# Altium footprint library CustomCase.PcbLib: 411 footprints (part 4 of 26)
Each footprint in its own frame and in the unit in brackets; x right, y up, seen from the top. Pads: shape width x height; smd on the part's side, far side on the other; paste and mask are expansions set on the pad; w line width, h text height; cw(c..) or ccw(c..) is an arc to the next point about the centre after c.
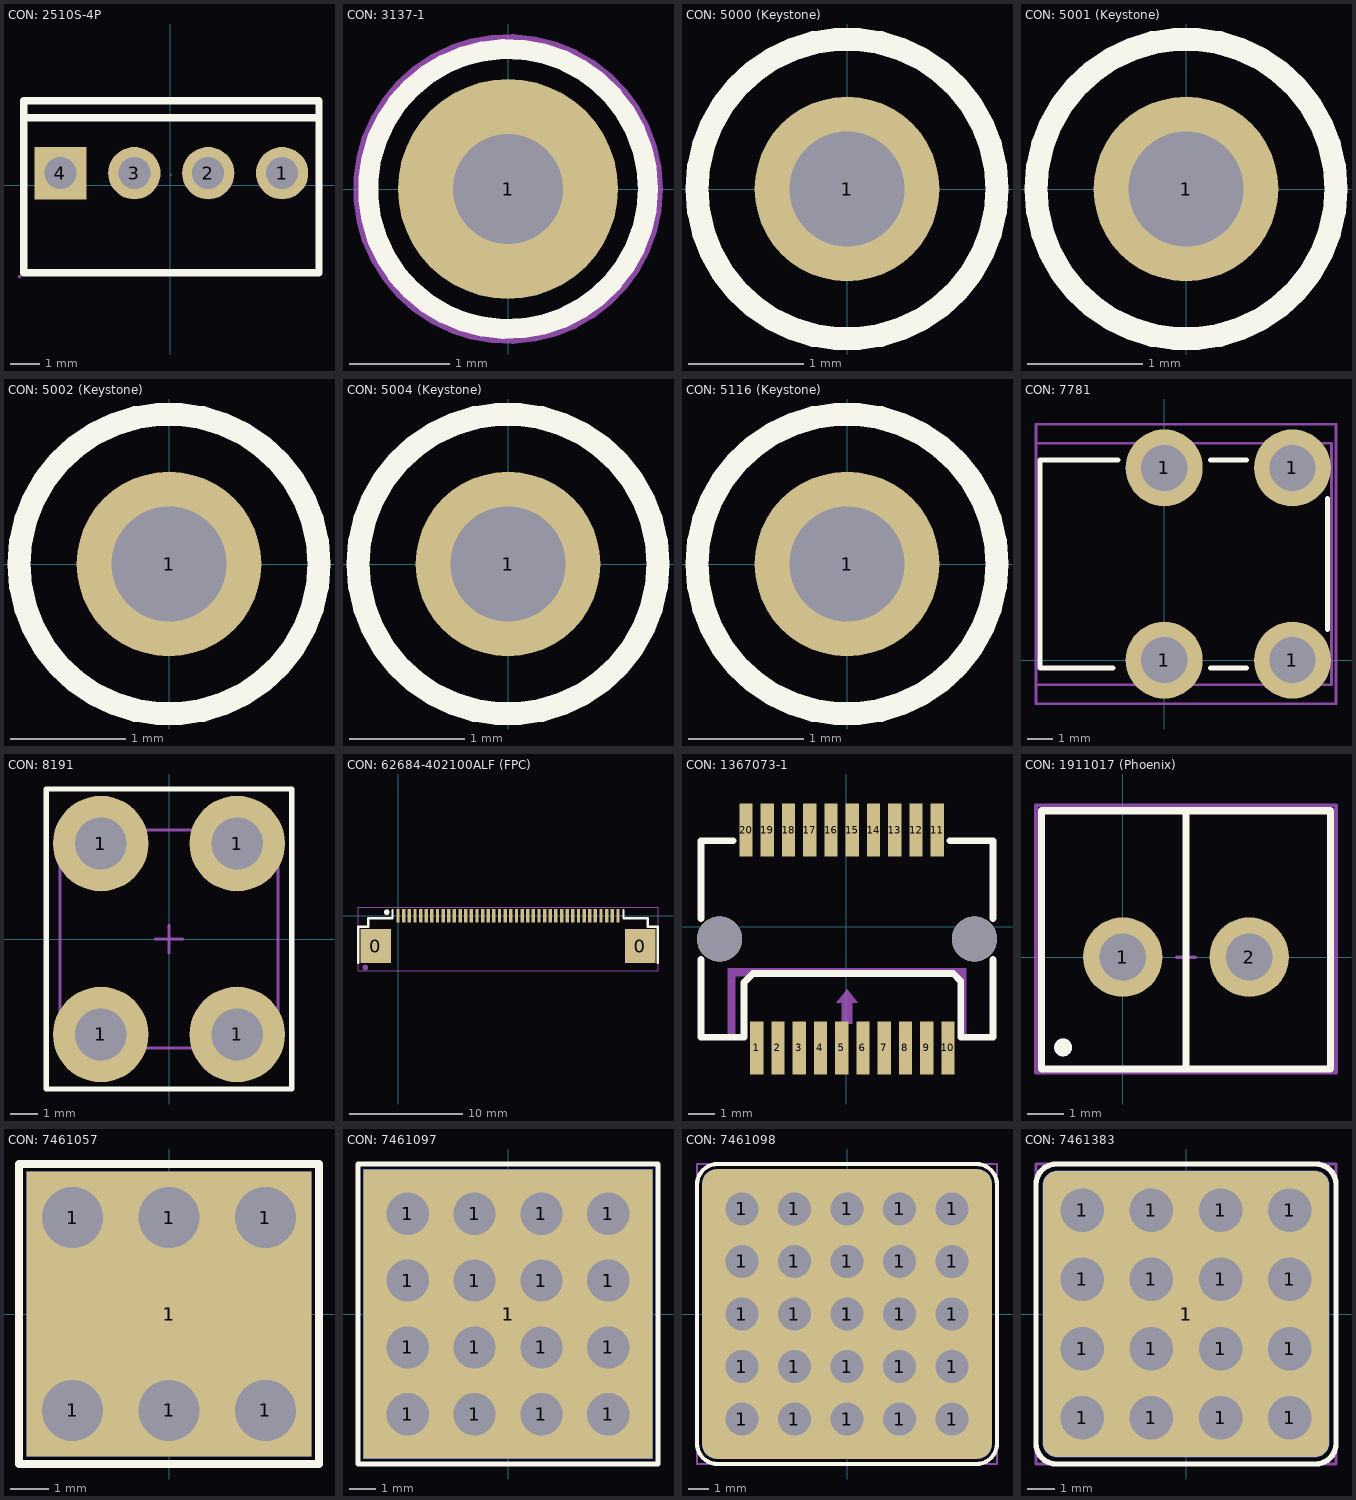
[diagram p3: the footprints below, top view; thin cyan lines are the x and y axes]

## CON: 2510S-4P [mm]
pads (4):
  round 1.8 hole 1.1: 1(3.847,0.425) 2(1.307,0.425) 3(-1.233,0.425)
  rect 1.8x1.8 hole 1.1: 4(-3.773,0.425)
Top Overlay:
  lines w0.254: -5.043,-2.623 -5.043,0.679 ; -5.043,2.33 5.117,2.33 ; -5.043,-3.004 -5.043,2.918 5.117,2.918 5.117,-3.004 -5.043,-3.004
Outside border (Mech5):
  circle w0.45: c3.847,0.425 r0.225
  circle w0.45: c1.307,0.425 r0.225
  circle w0.45: c-1.233,0.425 r0.225
  circle w0.45: c-3.773,0.425 r0.225
Mechanical 6:
  circle w0.06: c-5.17,-3.131 r0.03
Size Area:
  lines w0.003: -0.004,0.353 0.047,0.404
3D body "2510-4pin_step.step": height 11.4, standoff -2, extent -5.02,-2.8 5.1,3

## CON: 3137-1 [mm]
pads (1):
  round 2.2 hole 1.1: 1(0,0)
Top Overlay:
  circle w0.2: c0,0 r1.4
Top Assy:
  circle w0.1: c0,0 r1.4
Size Area:
  circle w0.1: c0,0 r1.5
3D body "mill-max-3137-1-00-15-00-00-08-0.STEP": height 1.1, standoff -6.57, extent -0.775,-0.775 0.8,0.8

## CON: 5000 (Keystone) [mm]
pads (1):
  round 1.6 hole 1: 1(0,0)
Top Overlay:
  circle w0.2: c0,0 r1.3
Top Assy:
  circle w0.1: c0,0 r1.3
Size Area:
  circle w0.1: c0,0 r1.3
3D body "User Library-TEST POINT RED Keystone 5000.STEP": height 4.94, standoff -3.02, extent -1.27,-1.27 1.27,1.27

## CON: 5001 (Keystone) [mm]
pads (1):
  round 1.6 hole 1: 1(0,0)
Top Overlay:
  circle w0.2: c0,0 r1.3
Top Assy:
  circle w0.1: c0,0 r1.3
Size Area:
  circle w0.1: c0,0 r1.3
3D body "User Library-TEST POINT BLK Keystone 5001.STEP": height 4.94, standoff -3.02, extent -1.27,-1.27 1.27,1.27

## CON: 5002 (Keystone) [mm]
pads (1):
  round 1.6 hole 1: 1(0,0)
Top Overlay:
  circle w0.2: c0,0 r1.3
Top Assy:
  circle w0.1: c0,0 r1.3
Size Area:
  circle w0.1: c0,0 r1.3
3D body "User Library-TEST POINT WHT Keystone 5002.STEP": height 4.94, standoff -3.02, extent -1.27,-1.27 1.27,1.27

## CON: 5004 (Keystone) [mm]
pads (1):
  round 1.6 hole 1: 1(0,0)
Top Overlay:
  circle w0.2: c0,0 r1.3
Top Assy:
  circle w0.1: c0,0 r1.3
Size Area:
  circle w0.1: c0,0 r1.3
3D body "User Library-TEST POINT YEL Keystone 5004.STEP": height 4.94, standoff -3.02, extent -1.27,-1.27 1.27,1.27

## CON: 5116 (Keystone) [mm]
pads (1):
  round 1.6 hole 1: 1(0,0)
Top Overlay:
  circle w0.2: c0,0 r1.3
Top Assy:
  circle w0.1: c0,0 r1.3
Size Area:
  circle w0.1: c0,0 r1.3
3D body "User Library-TEST POINT GRN Keystone 5116.STEP": height 4.94, standoff -3.02, extent -1.27,-1.27 1.27,1.27

## CON: 7781 [mm]
pads (4):
  round 3 hole 1.8: 1(0,0) 1(0,7.5) 1(5,0) 1(5,7.5)
Top Overlay:
  lines w0.2: -2,-0.3 -4.85,-0.3 -4.85,7.8 -1.8,7.8 ; 1.8,-0.3 3.2,-0.3 ; 1.8,7.8 3.2,7.8 ; 6.375,1.2 6.375,6.3
Top Assy:
  lines w0.1: -5,-0.957 6.523,-0.957 6.523,8.457 -5,8.457 -5,-0.957
Size Area:
  lines w0.1: -5,-1.7 -5,9.2 6.7,9.2 6.7,-1.7 -5,-1.7
3D body "keystone-PN7781.STEP": height 8.01, standoff -4.99, extent -5,-0.957 6.523,8.457

## CON: 8191 [mm]
pads (4):
  round 3.5 hole 1.9: 1(-2.5,-3.5) 1(-2.5,3.5) 1(2.5,-3.5) 1(2.5,3.5)
Top Overlay:
  lines w0.2: -4.5,-5.5 4.5,-5.5 4.5,5.5 -4.5,5.5 -4.5,-2.5 -4.5,-5.5
Top Assy:
  lines w0.1: -4,-4 4,-4 4,4 -4,4 -4,-4
Size Area:
  lines w0.1: -0.5,0 0.5,0 ; 0,-0.5 0,0.5 ; -4.5,-5.5 4.5,-5.5 4.5,5.5 -4.5,5.5 -4.5,-5.5
3D body "User Library-Terminal 10A Keystone 8191.STEP": height 7.05, standoff -4.45, extent -4,-4 4,4

## CON: 62684-402100ALF (FPC) [mm]
pads (44):
  rect 2.7x3 smd: 0(-1.975,-2.7) 0(21.475,-2.7)
  rect 0.3x1.2 smd: 1(0,0) 2(0.5,0) 3(1,0) 4(1.5,0) 5(2,0) 6(2.5,0) 7(3,0) 8(3.5,0) 9(4,0) 10(4.5,0) 11(5,0) 12(5.5,0) 13(6,0) 14(6.5,0) 15(7,0) 16(7.5,0) 17(8,0) 18(8.5,0) 19(9,0) 20(9.5,0) 21(10,0) 22(10.5,0) 23(11,0) 24(11.5,0) 25(12,0) 26(12.5,0) 27(13,0) 28(13.5,0) 29(14,0) 30(14.5,0) 31(15,0) 32(15.5,0) 33(16,0) 34(16.5,0) 35(17,0) 36(17.5,0) 37(18,0) 38(18.5,0) 39(19,0) 40(19.5,0)
  round 0.5 on Mech1: ""(-2.9,-4.6)
  round 0.5 on Top Overlay: ""(-1,0.3)
Top Overlay:
  lines w0.2: -3.525,-4.2 -3.525,-1 -2.65,-1 -2.65,-0.225 -0.5,-0.225 -0.5,0.5 ; 20,0.5 20,-0.225 22.15,-0.225 22.15,-1 23.025,-1 23.025,-4.2
Size Area:
  lines w0.1: -3.55,-4.9 -3.55,0.75 23.05,0.75 23.05,-4.9 -3.55,-4.9
3D body "62684-402100ALF.SLDPRT": height 2.05, standoff 0, extent -3,-5.4 22.5,0.2

## CON: 1367073-1 [mm]
pads (22):
  rect 0.5x2 smd: 1(-3.373,-4.557) 2(-2.573,-4.557) 3(-1.773,-4.557) 4(-0.973,-4.557) 5(-0.173,-4.557) 6(0.627,-4.557) 7(1.427,-4.557) 8(2.227,-4.557) 9(3.027,-4.557) 10(3.827,-4.557) 11(3.427,3.643) 12(2.627,3.643) 13(1.827,3.643) 14(1.027,3.643) 15(0.227,3.643) 16(-0.573,3.643) 17(-1.373,3.643) 18(-2.173,3.643) 19(-2.973,3.643) 20(-3.773,3.643)
  round 1.7 hole 1.7 unplated: ""(-4.772,-0.457) ""(4.826,-0.457)
Top Overlay:
  lines w0.254: -5.473,-1.228 -5.473,-4.157 -3.853,-4.157 -3.853,-2.091 -3.519,-1.757 ; -5.473,0.314 -5.473,3.243 -4.253,3.243 ; -3.518,-1.757 0.33,-1.757 4.028,-1.757 4.307,-2.037 4.307,-4.158 ; 3.909,3.243 5.427,3.243 5.527,3.243 5.527,0.314 ; 4.307,-4.157 5.527,-4.157 5.527,-1.228
Size Area:
  circle w0.7: c4.826,-0.457 r0.35
  region: 0.027,-2.357 -0.373,-2.857 -0.173,-2.857 -0.173,-3.657 0.227,-3.657 0.227,-2.857 0.427,-2.857
  region: -4.473,-4.157 -4.473,-1.557 4.527,-1.557 4.527,-4.157 4.227,-4.157 4.227,-1.857 -4.173,-1.857 -4.173,-4.157
  region: -4.772,0.243 -5.297,-0.457 -4.772,-1.157 -4.247,-0.457
3D body "1367073-1.step": height 5.3, standoff -0.8, extent -5.473,-5.157 5.527,4.243

## CON: 1911017 (Phoenix) [mm]
pads (4):
  round 2.2 hole 1.3: 1(0,0) 2(3.5,0)
  round 0.5 on Mech1: ""(-1.65,-2.5)
  round 0.5 on Top Overlay: ""(-1.65,-2.5)
Top Overlay:
  lines w0.2: 1.75,-3.1 1.75,4.05 ; -2.25,-3.1 -2.25,4.05 5.75,4.05 5.75,-3.1 -2.25,-3.1
Top Assy:
  lines w0.1: -2.25,-3.1 -2.25,4.05 5.75,4.05 5.75,-3.1 -2.25,-3.1
Size Area:
  lines w0.1: 1.5,0 2,0 ; 1.75,-0.25 1.75,0.25 ; -2.4,-3.2 5.9,-3.2 5.9,4.2 -2.4,4.2 -2.4,-3.2
3D body "1731471.SLDPRT": height 9.31, standoff -3.29, extent -2.2,-3 5.7,4.25

## CON: 7461057 [mm]
pads (8):
  round 2.2 hole 1.6: 1(-2.54,-2.54) 1(-2.54,2.54) 1(0,-2.54) 1(0,2.54) 1(2.54,-2.54) 1(2.54,2.54)
  rect 7.5x7.5 smd: 1(0,0)
  rect 7.5x7.5 smd far side: 1(0,0)
Top Overlay:
  lines w0.2: -3.95,-3.95 3.95,-3.95 3.95,3.95 -3.95,3.95 -3.95,-3.95
Top Assy:
  lines w0.1: -3.95,-3.95 -3.95,3.95 3.95,3.95 3.95,-3.95 -3.95,-3.95
Size Area:
  lines w0.1: -0.5,0 0.5,0 ; 0,-0.5 0,0.5 ; -3.95,-3.95 -3.95,3.95 3.95,3.95 3.95,-3.95 -3.95,-3.95
3D body "8888.STEP": height 6.05, standoff -3.45, extent -3.5,-3.5 3.5,3.5

## CON: 7461097 [mm]
pads (18):
  round 2.5 hole 1.6: 1(-3.81,-3.81) 1(-3.81,-1.27) 1(-3.81,1.27) 1(-3.81,3.81) 1(-1.27,-3.81) 1(-1.27,-1.27) 1(-1.27,1.27) 1(-1.27,3.81) 1(1.27,-3.81) 1(1.27,-1.27) 1(1.27,1.27) 1(1.27,3.81) 1(3.81,-3.81) 1(3.81,-1.27) 1(3.81,1.27) 1(3.81,3.81)
  rect 11x11 smd: 1(0,0)
  rect 11x11 smd far side: 1(0,0)
Top Overlay:
  lines w0.2: -5.7,-5.7 -5.7,5.7 5.7,5.7 5.7,-5.7 -5.7,-5.7
Top Assy:
  lines w0.1: -5.7,-5.7 -5.7,5.7 5.7,5.7 5.7,-5.7 -5.7,-5.7
Size Area:
  lines w0.1: -1,0 1,0 ; 0,-1 0,1 ; -5.7,-5.7 -5.7,5.7 5.7,5.7 5.7,-5.7 -5.7,-5.7
3D body "5555.STEP": height 10.55, standoff -3.45, extent -5,-5 5,5

## CON: 7461098 [mm]
pads (27):
  round 2.5 hole 1.6: 1(-5.08,-5.08) 1(-5.08,-2.54) 1(-5.08,0) 1(-5.08,2.54) 1(-5.08,5.08) 1(-2.54,-5.08) 1(-2.54,-2.54) 1(-2.54,0) 1(-2.54,2.54) 1(-2.54,5.08) 1(0,-5.08) 1(0,-2.54) 1(0,0) 1(0,2.54) 1(0,5.08) 1(2.54,-5.08) 1(2.54,-2.54) 1(2.54,0) 1(2.54,2.54) 1(2.54,5.08) 1(5.08,-5.08) 1(5.08,-2.54) 1(5.08,0) 1(5.08,2.54) 1(5.08,5.08)
  rrect10% 14x14 smd: 1(0,0)
  rrect10% 14x14 smd far side: 1(0,0)
Top Overlay:
  lines w0.2: -7.25,-6.25 ccw(c-6.25,-6.25) -6.25,-7.25 6.25,-7.25 ccw(c6.25,-6.25) 7.25,-6.25 7.25,6.25 ccw(c6.25,6.25) 6.25,7.25 -6.25,7.25 ccw(c-6.25,6.25) -7.25,6.25 -7.25,-6.25
Top Assy:
  lines w0.1: -6.5,6.5 -6.5,6.5 ; -6.5,6.5 -6.5,-6.5 6.5,-6.5 ; -6.5,6.5 6.5,6.5 6.5,-6.5 ; 6.5,-6.5 6.5,-6.5
Size Area:
  lines w0.1: -0.5,0 0.5,0 ; 0,-0.5 0,0.5 ; -7.25,-7.25 -7.25,7.25 7.25,7.25 7.25,-7.25 -7.25,-7.25
3D body "74610981.STEP": height 15.5, standoff -3.5, extent -6.5,-6.5 6.5,6.5

## CON: 7461383 [mm]
pads (18):
  round 2.5 hole 1.6: 1(-3.81,-3.81) 1(-3.81,-1.27) 1(-3.81,1.27) 1(-3.81,3.81) 1(-1.27,-3.81) 1(-1.27,-1.27) 1(-1.27,1.27) 1(-1.27,3.81) 1(1.27,-3.81) 1(1.27,-1.27) 1(1.27,1.27) 1(1.27,3.81) 1(3.81,-3.81) 1(3.81,-1.27) 1(3.81,1.27) 1(3.81,3.81)
  rrect10% 10.5x10.5 smd: 1(0,0)
  rrect10% 10.5x10.5 smd far side: 1(0,0)
Top Overlay:
  lines w0.2: -5.5,-4.75 ccw(c-4.75,-4.75) -4.75,-5.5 4.75,-5.5 ccw(c4.75,-4.75) 5.5,-4.75 5.5,4.75 ccw(c4.75,4.75) 4.75,5.5 -4.75,5.5 ccw(c-4.75,4.75) -5.5,4.75 -5.5,-4.75
Top Assy:
  lines w0.1: -4.5,-4.5 4.5,-4.5 4.5,4.5 -4.5,4.5 ; -4.5,-4.5 -4.5,-4.5 ; -4.5,-4.5 -4.5,4.5 ; -4.5,4.5 -4.5,4.5
Size Area:
  lines w0.1: -0.5,0 0.5,0 ; 0,-0.5 0,0.5 ; -5.5,-5.5 -5.5,5.5 5.5,5.5 5.5,-5.5 -5.5,-5.5
3D body "7461383.STEP": height 12.5, standoff -3.5, extent -4.5,-4.5 4.5,4.5